# Altium integrated library SP721ABT.IntLib: 1 symbol
Pins are listed as number, name and electrical type; pins without a type are passive.

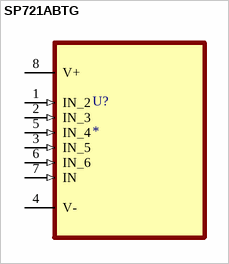
[diagram p0: symbol SP721ABTG]

## SP721ABTG
designator U?
Mixed Technology TVS Device 6 Circuit Surface Mount 8-SOIC; MF: Littelfuse Inc.; MP: SP721ABTG; SnapEDA_Link: https://www.snapeda.com/parts/SP721ABTG/Littelfuse/view-part/?ref=snap; Package: SOIC-8 Littelfuse; Value: *; Check_prices: https://www.snapeda.com/parts/SP721ABTG/Littelfuse/view-part/?ref=eda
footprint SOIC127P600X175-8N
pins: 1 IN_2 (in), 2 IN_3 (in), 3 IN_5 (in), 4 V-, 5 IN_4 (in), 6 IN_6 (in), 7 IN (in), 8 V+ (power)